# Altium footprint library EWELECTRONICS_SGC3S.PcbLib: 1 footprints
Each footprint in its own frame and in the unit in brackets; x right, y up, seen from the top. Pads: shape width x height; smd on the part's side, far side on the other; paste and mask are expansions set on the pad; w line width, h text height; cw(c..) or ccw(c..) is an arc to the next point about the centre after c.
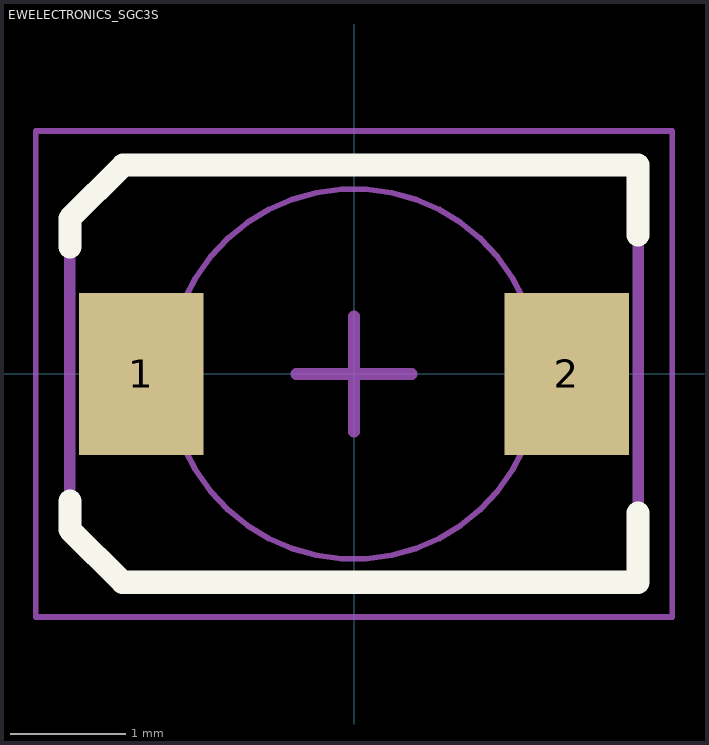
[diagram p0: the footprint, top view; thin cyan lines are the x and y axes]

## EWELECTRONICS_SGC3S [mm]
height 1.91
pads (2):
  rect 1.075x1.4 smd: 1(-1.837,0) 2(1.837,0)
Top Overlay:
  lines w0.2: -2.455,-1.1 -2.455,-1.345 -2,-1.8 2.455,-1.8 2.455,-1.2 ; -2.455,1.1 -2.455,1.345 -1.995,1.805 2.455,1.805 2.455,1.2
Mechanical 13:
  circle w0.05: c0,0 r1.601
  lines w0.1: -2.455,-1.345 -1.995,-1.805 2.455,-1.805 2.455,1.805 -1.995,1.805 -2.455,1.345 -2.455,-1.345
Mechanical 15:
  lines w0.05: -2.75,-2.1 2.75,-2.1 2.75,2.1 -2.75,2.1 -2.75,-2.1
  lines w0.1: -0.5,0 0.5,0 ; 0,-0.5 0,0.5
3D body: height 1.91, standoff 0, extent -1.601,-1.601 1.601,1.601
3D body: height 1.28, standoff 0, extent -2.455,-1.805 2.455,1.805